# Altium footprint library LimeMicroAltiumLib.PcbLib: 876 footprints (part 45 of 57)
Each footprint in its own frame and in the unit in brackets; x right, y up, seen from the top. Pads: shape width x height; smd on the part's side, far side on the other; paste and mask are expansions set on the pad; w line width, h text height; cw(c..) or ccw(c..) is an arc to the next point about the centre after c.
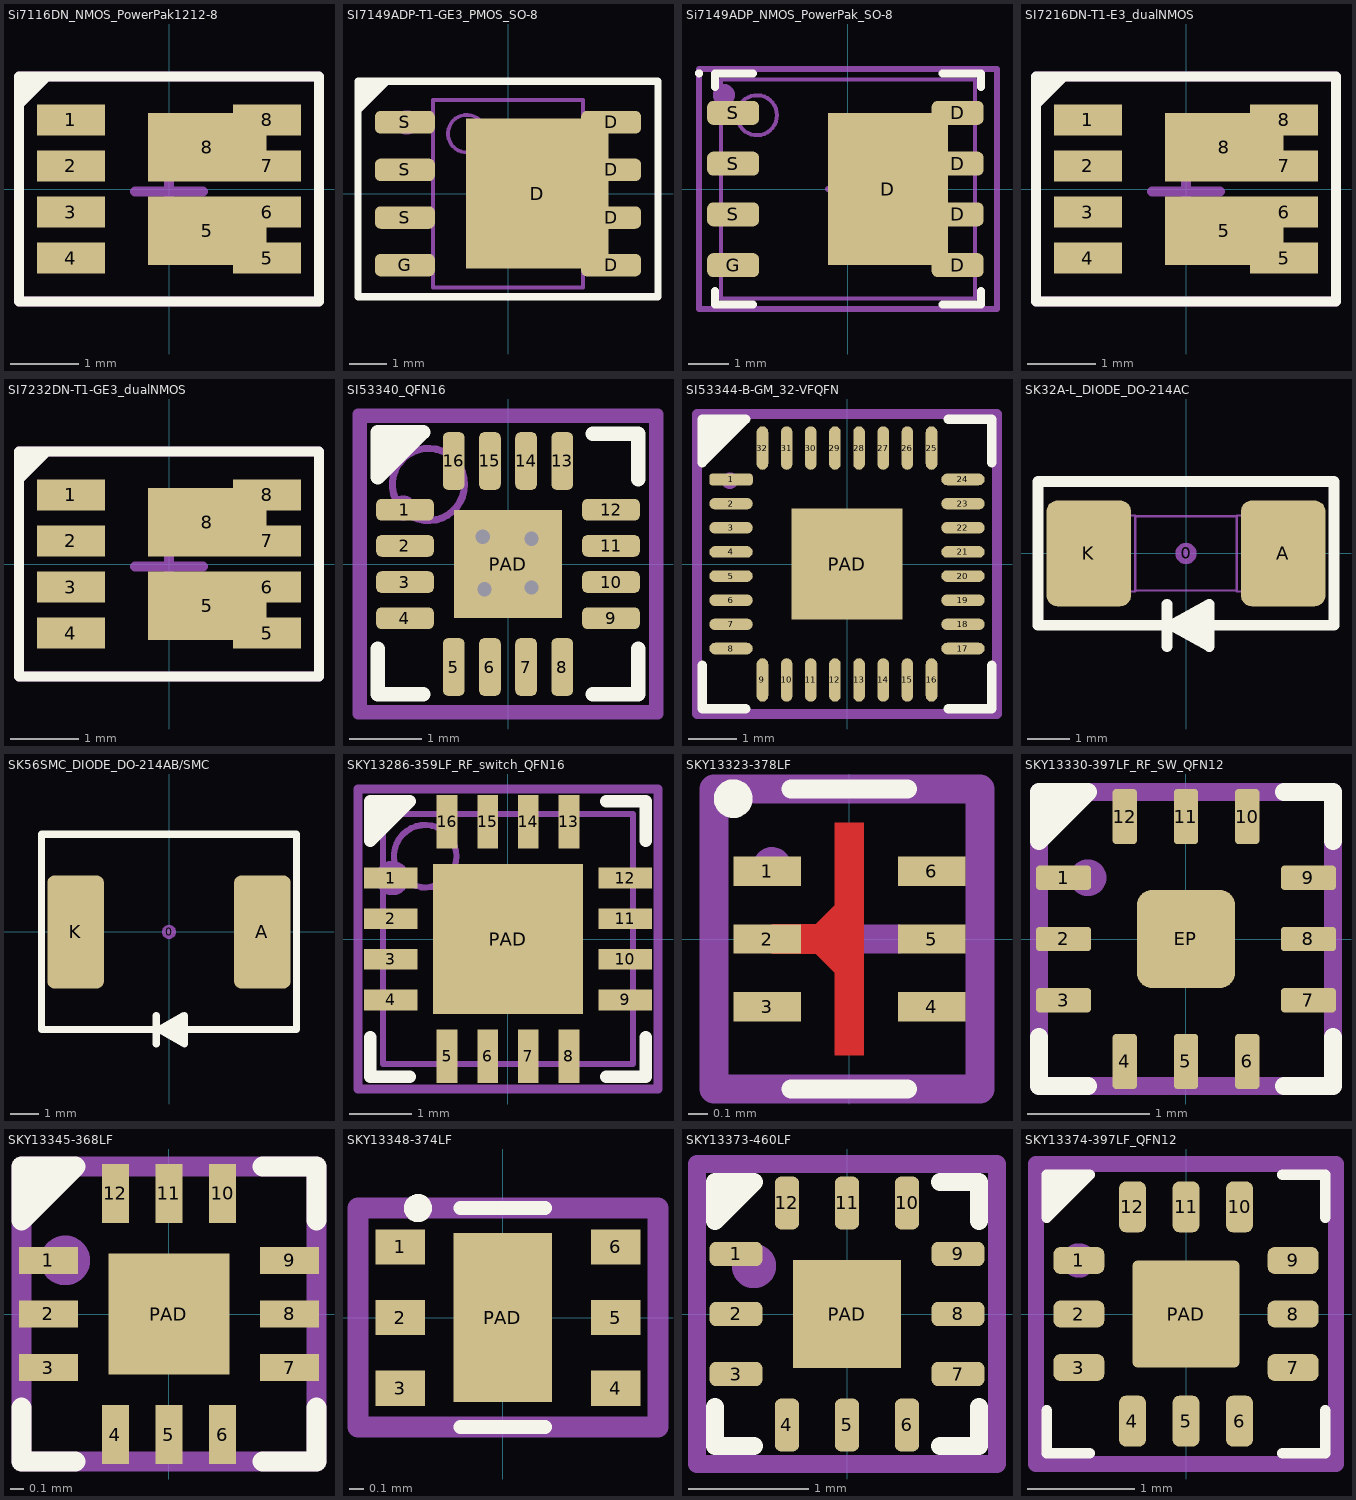
[diagram p44: the footprints below, top view; thin cyan lines are the x and y axes]

## Si7116DN_NMOS_PowerPak1212-8 [mm]
height 1.7
pads (10):
  rect 1x0.45 smd mask+0.05: 1(-1.438,1.012) 2(-1.438,0.337) 3(-1.438,-0.337) 4(-1.438,-1.012) 5(1.438,-1.012) 6(1.438,-0.337) 7(1.438,0.337) 8(1.438,1.012)
  rect 1.74x1 smd mask+0.05: 5(0.563,-0.612) 8(0.563,0.612)
Top Overlay:
  region: -2.2,1.65 -2.2,1.15 -1.7,1.65
  lines w0.15: -2.2,-1.65 2.2,-1.65 2.2,1.65 -2.2,1.65 -2.2,-1.65
Mechanical 15:
  lines w0.15: -0.5,-0.038 0,-0.038 ; 0,-0.537 0,-0.038 ; 0,0.462 0,-0.038 ; 0.5,-0.038 0,-0.038 ; -2.2,-1.65 -2.2,1.65 2.2,1.65 2.2,-1.65 -2.2,-1.65
  text "1" at -1.525,0.725 h0.55
  text ".Designator" at 0,-0.038 h0.55
  text "4" at -1.9,-1.538 h0.55
3D body "User Library-PowerPAK 1212-8-SiS892DN.step": height 1.04, standoff 0, extent -1.65,-1.65 1.65,1.65

## SI7149ADP-T1-GE3_PMOS_SO-8 [mm] "SOIC, 8-Leads, Body 4.9x3.9mm, Pitch 1.27mm, IPC Medium Density"
height 1.75
pads (9):
  rect 3.8x4 smd mask+0.1: D(0.775,0)
  rrect50% 1.6x0.6 smd: D(2.75,-1.905) D(2.75,-0.635) D(2.75,0.635) D(2.75,1.905) G(-2.75,-1.905) S(-2.75,-0.635) S(-2.75,0.635) S(-2.75,1.905)
Top Overlay:
  region: -3.1,3 -4,2.1 -4,3
  lines w0.2: -4,-2.75 4,-2.75 4,3 -4,3 -4,-2.75
Mechanical 13:
  circle w0.1: c-1.1,1.6 r0.5
  lines w0.1: -2,-2.5 2,-2.5 2,2.5 -2,2.5 -2,-2.5
Mechanical 15:
  circle w0.35: c-2.7,1.9 r0.15
  lines w0.15: -0.5,0 0.5,0 ; 0,-0.5 0,0.5 ; -4,-2.75 4,-2.75 4,3 -4,3 -4,-2.75
  text ".Designator" at 0,0 h0.55

## Si7149ADP_NMOS_PowerPak_SO-8 [mm]
height 1.7
pads (9):
  rect 3x3.8 smd paste-2.025: D(1,0)
  rrect50% 1.3x0.6 smd: D(2.745,-1.905) D(2.745,-0.635) D(2.745,0.635) D(2.745,1.905) G(-2.87,-1.905) S(-2.87,-0.635) S(-2.87,0.635) S(-2.87,1.905)
Top Overlay:
  circle w0.1: c-3.725,2.895 r0.05
  lines w0.2: -3.325,-2.555 -3.325,-2.895 -2.37,-2.895 ; -3.325,2.555 -3.325,2.895 -2.37,2.895 ; 2.37,-2.895 3.325,-2.895 3.325,-2.555 ; 2.37,2.895 3.325,2.895 3.325,2.555
Mechanical 13:
  circle w0.1: c-2.275,1.845 r0.5
  lines w0.1: -3.175,-2.745 -3.175,2.745 3.175,2.745 3.175,-2.745 -3.175,-2.745
Mechanical 15:
  circle w0.35: c-3.1,2.35 r0.1
  lines w0.15: -0.5,0 0.5,0 ; 0,-0.5 0,0.5 ; -3.73,-3 -3.73,3 3.73,3 3.73,-3 -3.73,-3
  text "8" at 1.65,1.6 h0.55
  text "7" at 1.675,0.3 h0.55
  text "6" at 1.625,-0.95 h0.55
  text "5" at 1.625,-2.2 h0.55
  text "4" at -2.15,-2.2 h0.55
  text "3" at -2.125,-0.9 h0.55
  text "2" at -2.1,0.4 h0.55
  text "1" at -1.975,1.675 h0.55
  text ".Designator" at 0,0 h0.55
3D body "User Library-PowerPAK SO-8 (S).step": height 1.04, standoff 0, extent -3.075,-2.575 3.075,2.575

## SI7216DN-T1-E3_dualNMOS [mm]
pads (10):
  rect 1x0.45 smd mask+0.05: 1(-1.438,1.012) 2(-1.438,0.337) 3(-1.438,-0.337) 4(-1.438,-1.012) 5(1.438,-1.012) 6(1.438,-0.337) 7(1.438,0.337) 8(1.438,1.012)
  rect 1.74x1 smd mask+0.05: 5(0.563,-0.612) 8(0.563,0.612)
Top Overlay:
  region: -2.2,1.65 -2.2,1.15 -1.7,1.65
  lines w0.15: -2.2,-1.65 -2.2,1.65 2.2,1.65 2.2,-1.65 -2.2,-1.65
Mechanical 15:
  lines w0.15: -0.5,-0.038 0,-0.038 ; 0,-0.537 0,-0.038 ; 0,0.462 0,-0.038 ; 0.5,-0.038 0,-0.038 ; -2.2,-1.65 2.2,-1.65 2.2,1.65 -2.2,1.65 -2.2,-1.65
  text "4" at -1.9,-1.538 h0.55
  text "1" at -1.7,0.462 h0.55
  text ".Designator" at 0,-0.038 h0.55
3D body "User Library-SI7913DN-T1-GE3.step": height 1.12, standoff 0, extent -1.655,-1.65 1.655,1.65

## SI7232DN-T1-GE3_dualNMOS [mm]
pads (10):
  rect 1x0.45 smd mask+0.05: 1(-1.438,1.012) 2(-1.438,0.337) 3(-1.438,-0.337) 4(-1.438,-1.012) 5(1.438,-1.012) 6(1.438,-0.337) 7(1.438,0.337) 8(1.438,1.012)
  rect 1.74x1 smd mask+0.05: 5(0.563,-0.612) 8(0.563,0.612)
Top Overlay:
  region: -2.2,1.65 -2.2,1.15 -1.7,1.65
  lines w0.15: -2.2,-1.65 -2.2,1.65 2.2,1.65 2.2,-1.65 -2.2,-1.65
Mechanical 15:
  lines w0.15: -0.5,-0.038 0,-0.038 ; 0,-0.537 0,-0.038 ; 0,0.462 0,-0.038 ; 0.5,-0.038 0,-0.038 ; -2.2,-1.65 2.2,-1.65 2.2,1.65 -2.2,1.65 -2.2,-1.65
  text "4" at -1.9,-1.538 h0.55
  text "1" at -1.7,0.462 h0.55
  text ".Designator" at 0,-0.038 h0.55
3D body "User Library-SI7913DN-T1-GE3.step": height 1.12, standoff 0, extent -1.655,-1.65 1.655,1.65

## SI53340_QFN16 [mm]
pads (17):
  rrect50% 0.8x0.3 smd mask+0.05: 1(-1.425,0.75) 2(-1.425,0.25) 3(-1.425,-0.25) 4(-1.425,-0.75) 9(1.425,-0.75) 10(1.425,-0.25) 11(1.425,0.25) 12(1.425,0.75)
  rrect50% 0.3x0.8 smd mask+0.05: 5(-0.75,-1.425) 6(-0.25,-1.425) 7(0.25,-1.425) 8(0.75,-1.425) 13(0.75,1.425) 14(0.25,1.425) 15(-0.25,1.425) 16(-0.75,1.425)
  rect 1.5x1.5 smd mask+0.05: PAD(0,0)
via -0.35,0.375 diameter 0.4 hole 0.2
via 0.325,0.35 diameter 0.4 hole 0.2
via 0.325,-0.325 diameter 0.4 hole 0.2
via -0.325,-0.35 diameter 0.4 hole 0.2
Top Overlay:
  region: -1.8,1.825 -1.8,1.2 -1.175,1.825
  lines w0.2: -1.8,-1.175 -1.8,-1.8 -1.175,-1.8 ; 1.175,-1.8 1.8,-1.8 1.8,-1.175 ; 1.175,1.8 1.8,1.8 1.8,1.175 ; -1.8,1.2 -1.175,1.825 -1.8,1.825 -1.8,1.2
Mechanical 13:
  circle w0.1: c-1.1,1.1 r0.5
  lines w0.1: -2,-2 2,-2 2,2 -2,2 -2,-2
Mechanical 15:
  circle w0.35: c-1.45,0.775 r0
  lines w0.15: -0.5,0 0.5,0 ; 0,-0.5 0,0.5 ; -2.075,-2.075 2.075,-2.075 2.075,2.075 -2.075,2.075 -2.075,-2.075
  text ".Designator" at 0,0 h0.55
3D body "User Library-qfn16-3x3.step": height 0.92, standoff 0, extent -1.5,-1.5 1.5,1.5

## SI53344-B-GM_32-VFQFN [mm]
pads (33):
  rrect50% 0.9x0.24 smd paste+0 mask+0.05: 1(-2.401,1.75)
  rrect100% 0.9x0.24 smd paste+0 mask+0.05: 2(-2.401,1.25) 3(-2.401,0.75) 4(-2.401,0.25) 5(-2.401,-0.25) 6(-2.401,-0.75) 7(-2.401,-1.25) 8(-2.401,-1.75) 17(2.401,-1.75) 18(2.401,-1.25) 19(2.401,-0.75) 20(2.401,-0.25) 21(2.401,0.25) 22(2.401,0.75) 23(2.401,1.25) 24(2.401,1.75)
  rrect100% 0.24x0.9 smd paste+0 mask+0.05: 9(-1.75,-2.401) 10(-1.25,-2.401) 11(-0.75,-2.401) 12(-0.25,-2.401) 13(0.25,-2.401) 14(0.75,-2.401) 15(1.25,-2.401) 16(1.75,-2.401) 25(1.75,2.401) 26(1.25,2.401) 27(0.75,2.401) 28(0.25,2.401) 29(-0.25,2.401) 30(-0.75,2.401) 31(-1.25,2.401) 32(-1.75,2.401)
  rect 2.3x2.3 smd paste+0 mask+0.05: PAD(0,0)
Top Overlay:
  region: -3,2.1 -3,3
  region: -3,2.1 -2.1,3 -3,3
  lines w0.2: -3,-2.1 -3,-3 -2.1,-3 ; 2.1,-3 3,-3 3,-2.1 ; 2.1,3 3,3 3,2.1 ; -3,2.1 -3,3 -2.1,3 -3,2.1
Mechanical 15:
  circle w0.2: c-2.425,1.725 r0.071
  lines w0.2: -0.85,0 0,0 ; 0,-0.85 0,0 ; 0,0.85 0,0 ; 0.85,0 0,0 ; -3.106,-3.106 -3.106,3.106 3.106,3.106 3.106,-3.106 -3.106,-3.106
  text ".Designator" at 0,0 h0.55
3D body "IC_Silicon_Labs_SI53344-B-GM_eec.STEP": height 0.25, standoff 0, extent -3.106,-3.106 3.106,3.106

## SK32A-L_DIODE_DO-214AC [mm]
pads (3):
  round 0.508 on Mech15: 0(0,0)
  rrect25% 2x2.5 smd: A(2.3,0) K(-2.3,0)
Top Overlay:
  lines w0.254: -0.45,-2.2 -0.45,-1.2 ; 0.05,-1.9 0.55,-1.9 ; 0.15,-1.5 0.55,-1.5 ; 0.55,-1.7 0.35,-1.7 -0.35,-1.7 ; -0.35,-1.7 0.55,-1.2 0.55,-2.2 -0.35,-1.7 ; -3.5,-1.7 3.5,-1.7 3.5,1.7 -3.5,1.7 -3.5,-1.7
Mechanical 13:
  lines w0.05: -1.2,-0.88 1.2,-0.88 ; -1.2,0.88 1.2,0.88 ; -1.7,-0.9 -1.2,-0.9 -1.2,0.9 -1.7,0.9 -1.7,-0.9 ; 1.2,-0.9 1.7,-0.9 1.7,0.9 1.2,0.9 1.2,-0.9
Mechanical 15:
  lines w0.15: -0.45,-2.2 -0.45,-1.2 ; 0.05,-1.9 0.55,-1.9 ; 0.15,-1.5 0.55,-1.5 ; 0.55,-1.7 0.35,-1.7 -0.35,-1.7 ; -0.35,-1.7 0.55,-2.2 0.55,-1.2 -0.35,-1.7 ; -3.5,-1.7 -3.5,1.7 3.5,1.7 3.5,-1.7 -3.5,-1.7
  text ".Designator" at 0,0 h0.55
  text "C" at -2.2,-0.5 h0.55
  text "A" at 1.7,-0.5 h0.55
3D body "User Library-DO-214AA SMB.step": height 2.3, standoff 0, extent -2.7,-1.8 2.7,1.8

## SK56SMC_DIODE_DO-214AB/SMC [mm]
pads (3):
  round 0.508 on Mech15: 0(0,0)
  rrect25% 2x4 smd: A(3.3,0) K(-3.3,0)
Top Overlay:
  lines w0.254: -0.45,-3.95 -0.45,-2.95 ; 0.05,-3.65 0.55,-3.65 ; 0.15,-3.25 0.55,-3.25 ; 0.55,-3.45 0.35,-3.45 -0.35,-3.45 ; -0.35,-3.45 0.55,-3.95 0.55,-2.95 -0.35,-3.45 ; -4.5,-3.45 -4.5,3.45 4.5,3.45 4.5,-3.45 -4.5,-3.45
Mechanical 15:
  lines w0.15: -0.45,-3.95 -0.45,-2.95 ; 0.05,-3.65 0.55,-3.65 ; 0.15,-3.25 0.55,-3.25 ; 0.55,-3.45 0.35,-3.45 -0.35,-3.45 ; -0.35,-3.45 0.55,-2.95 0.55,-3.95 -0.35,-3.45 ; -4.5,-3.45 4.5,-3.45 4.5,3.45 -4.5,3.45 -4.5,-3.45
  text "A" at 1.7,-0.5 h0.55
  text "C" at -2.2,-0.5 h0.55
  text ".Designator" at 0,0 h0.55
3D body "User Library-DO-214AB SMC.step": height 2.3, standoff 0, extent -3.975,-2.95 3.975,2.95

## SKY13286-359LF_RF_switch_QFN16 [mm]
pads (17):
  rect 0.85x0.33 smd mask+0.05: 1(-1.875,0.975) 2(-1.875,0.325) 3(-1.875,-0.325) 4(-1.875,-0.975) 9(1.875,-0.975) 10(1.875,-0.325) 11(1.875,0.325) 12(1.875,0.975)
  rect 0.33x0.85 smd mask+0.05: 5(-0.975,-1.875) 6(-0.325,-1.875) 7(0.325,-1.875) 8(0.975,-1.875) 13(0.975,1.875) 14(0.325,1.875) 15(-0.325,1.875) 16(-0.975,1.875)
  rect 2.4x2.4 smd mask+0.05: PAD(0,0)
Top Overlay:
  region: -2.2,1.575 -2.2,2.2 -1.575,2.2
  lines w0.2: -2.2,-1.575 -2.2,-2.2 -1.575,-2.2 ; 1.575,-2.2 2.2,-2.2 2.2,-1.575 ; 1.575,2.2 2.2,2.2 2.2,1.575 ; -2.2,1.575 -1.575,2.2 -2.2,2.2 -2.2,1.575
Mechanical 13:
  circle w0.1: c-1.325,1.325 r0.5
  lines w0.1: -2,-2 2,-2 2,2 -2,2 -2,-2
Mechanical 15:
  circle w0.35: c-1.85,0.975 r0.1
  lines w0.15: -0.525,0.025 0.475,0.025 ; -0.025,-0.475 -0.025,0.525 ; -2.4,-2.4 2.4,-2.4 2.4,2.4 -2.4,2.4 -2.4,-2.4
  text ".Designator" at 0,0 h0.55
3D body "User Library-qfn16-4x4.step": height 0.92, standoff 0, extent -2,-2 2,2

## SKY13323-378LF [mm] "SKY13323-378LF RF switch"
pads (6):
  rect 0.35x0.15 smd paste-0.1 mask+0.05: 1(-0.425,0.35) 2(-0.425,0) 3(-0.425,-0.35) 4(0.425,-0.35) 5(0.425,0) 6(0.425,0.35)
Top Layer:
  region: -0.4,-0.075 -0.175,-0.075 -0.075,-0.175 -0.075,-0.6 0.075,-0.6 0.075,0 -0.4,0
  region: -0.4,0.075 -0.175,0.075 -0.075,0.175 -0.075,0.6 0.075,0.6 0.075,0 -0.4,0
Top Overlay:
  circle w0.1: c-0.6,0.725 r0.05
  lines w0.1: -0.3,-0.775 0.3,-0.775 ; -0.3,0.775 0.3,0.775
Top Paste:
  drawing of 24 lines, arcs and shapes, not listed
Mechanical 15:
  circle w0.1: c-0.4,0.375 r0.05
  lines w0.15: -0.25,0 0,0 ; 0,-0.25 0,0 ; 0,0.25 0,0 ; 0.25,0 0,0 ; -0.7,-0.775 -0.7,0.775 0.675,0.775 0.675,-0.775 -0.7,-0.775
  text ".Designator" at 0,0 h0.55
3D body: height 0.51, standoff 0.5, extent -0.425,0.225 -0.225,0.425
3D body: height 0.5, standoff 0, extent -0.5,-0.5 0.5,0.5

## SKY13330-397LF_RF_SW_QFN12 [mm]
pads (13):
  rrect30% 0.45x0.2 smd mask+0.05: 1(-1,0.5) 2(-1,0) 3(-1,-0.5) 7(1,-0.5) 8(1,0) 9(1,0.5)
  rrect30% 0.2x0.45 smd mask+0.05: 4(-0.5,-1) 5(0,-1) 6(0.5,-1) 10(0.5,1) 11(0,1) 12(-0.5,1)
  rrect30% 0.8x0.8 smd mask+0.05: EP(0,0)
Top Overlay:
  region: -1.2,0.8 -1.2,1.2 -0.8,1.2
  lines w0.15: -1.2,-0.8 -1.2,-1.2 -0.8,-1.2 ; 0.8,-1.2 1.2,-1.2 1.2,-0.8 ; 0.8,1.2 1.2,1.2 1.2,0.8 ; -1.2,0.8 -0.8,1.2 -1.2,1.2 -1.2,0.8
Mechanical 15:
  circle w0.2: c-0.8,0.5 r0.05
  lines w0.15: -0.3,0 0,0 ; 0,-0.3 0,0 ; 0,0.3 0,0 ; 0.3,0 0,0 ; -1.2,-1.2 1.2,-1.2 1.2,1.2 -1.2,1.2 -1.2,-1.2
  text ".Designator" at 0,0 h0.55
3D body: height 0.56, standoff 0, extent -0.899,0.6 -0.601,0.9
3D body: height 0.55, standoff 0, extent -1,-1 1,1

## SKY13345-368LF [mm]
pads (13):
  rect 0.44x0.2 smd mask+0.05: 1(-0.9,0.4) 2(-0.9,0) 3(-0.9,-0.4) 7(0.9,-0.4) 8(0.9,0) 9(0.9,0.4)
  rect 0.2x0.44 smd mask+0.05: 4(-0.4,-0.9) 5(0,-0.9) 6(0.4,-0.9) 10(0.4,0.9) 11(0,0.9) 12(-0.4,0.9)
  rect 0.9x0.9 smd mask+0.05: PAD(0,0)
Top Overlay:
  region: -1.1,0.65 -0.65,1.1 -1.1,1.1
  lines w0.15: -1.1,-0.7 -1.1,-1.1 -0.7,-1.1 ; 0.7,-1.1 1.1,-1.1 1.1,-0.7 ; 0.7,1.1 1.1,1.1 1.1,0.7 ; -1.1,0.7 -0.7,1.1 -1.1,1.1 -1.1,0.7
Mechanical 15:
  circle w0.3: c-0.775,0.4 r0.035
  lines w0.15: -0.2,0 0.2,0 ; 0,-0.2 0,0.2 ; -1.1,-1.1 -1.1,1.1 1.1,1.1 1.1,-1.1 -1.1,-1.1
  text ".Designator" at 0,0 h0.55
3D body: height 0.55, standoff 0, extent -1,-1 1,1
3D body: height 0.56, standoff 0, extent -0.849,0.65 -0.65,0.85

## SKY13348-374LF [mm] "SKY13348-374LF RF switch"
pads (7):
  rect 0.35x0.25 smd mask+0.05: 1(-0.725,0.5) 2(-0.725,0) 3(-0.725,-0.5) 4(0.8,-0.5) 5(0.8,0) 6(0.8,0.5)
  rect 0.7x1.2 smd mask+0.05: PAD(0,0)
Top Overlay:
  circle w0.1: c-0.6,0.775 r0.05
  lines w0.1: -0.3,-0.775 0.3,-0.775 ; -0.3,0.775 0.3,0.775
Mechanical 15:
  circle w0.1: c-0.75,0.5 r0.05
  lines w0.15: -0.25,0 0,0 ; 0,-0.25 0,0 ; 0,0.25 0,0 ; 0.25,0 0,0 ; -1.025,-0.775 -1.025,0.775 1.1,0.775 1.1,-0.775 -1.025,-0.775
  text ".Designator" at 0,0 h0.55
3D body: height 0.51, standoff 0.5, extent -0.625,0.45 -0.425,0.65
3D body: height 0.5, standoff 0, extent -0.725,-0.75 0.775,0.75

## SKY13373-460LF [mm]
pads (13):
  rrect50% 0.44x0.2 smd mask+0.05: 1(-0.925,0.5) 2(-0.925,0) 3(-0.925,-0.5) 7(0.925,-0.5) 8(0.925,0) 9(0.925,0.5)
  rrect50% 0.2x0.44 smd mask+0.05: 4(-0.5,-0.925) 5(0,-0.925) 6(0.5,-0.925) 10(0.5,0.925) 11(0,0.925) 12(-0.5,0.925)
  rect 0.9x0.9 smd mask+0.05: PAD(0,0)
Top Overlay:
  region: -1.1,0.775 -0.775,1.1 -1.1,1.1
  lines w0.15: -1.1,-0.775 -1.1,-1.1 -0.775,-1.1 ; 0.775,-1.1 1.1,-1.1 1.1,-0.775 ; 0.775,1.1 1.1,1.1 1.1,0.775 ; -1.1,0.775 -1.1,1.1 -0.775,1.1 -1.1,0.775
Mechanical 15:
  circle w0.3: c-0.775,0.4 r0.035
  lines w0.15: -0.2,0 0.2,0 ; 0,-0.2 0,0.2 ; -1.25,-1.25 1.25,-1.25 1.25,1.25 -1.25,1.25 -1.25,-1.25
  text ".Designator" at 0,0 h0.55
3D body: height 0.56, standoff 0, extent -0.849,0.65 -0.65,0.85
3D body: height 0.55, standoff 0, extent -1,-1 1,1

## SKY13374-397LF_QFN12 [mm]
pads (13):
  rrect50% 0.475x0.25 smd mask+0.05: 1(-1,0.5) 2(-1,0) 3(-1,-0.5) 7(1,-0.5) 8(1,0) 9(1,0.5)
  rrect50% 0.25x0.475 smd mask+0.05: 4(-0.5,-1) 5(0,-1) 6(0.5,-1) 10(0.5,1) 11(0,1) 12(-0.5,1)
  rrect10% 1x1 smd mask+0.05: PAD(0,0)
Top Overlay:
  region: -1.3,0.85 -0.85,1.3 -1.3,1.3
  lines w0.1: -1.3,-0.9 -1.3,-1.3 -0.9,-1.3 ; 0.9,-1.3 1.3,-1.3 1.3,-0.9 ; 0.9,1.3 1.3,1.3 1.3,0.9 ; -1.3,0.9 -1.3,1.3 -0.9,1.3 -1.3,0.9
Mechanical 15:
  circle w0.25: c-1,0.5 r0.035
  lines w0.15: -0.2,0 0.2,0 ; 0,-0.2 0,0.2 ; -1.4,-1.4 1.4,-1.4 1.4,1.4 -1.4,1.4 -1.4,-1.4
  text ".Designator" at 0,0 h0.55
3D body: height 0.55, standoff 0, extent -1,-1 1,1
3D body: height 0.58, standoff 0.53, extent -0.873,0.476 -0.475,0.875